# Altium footprint library RF_FILTER.PcbLib: 10 footprints
Each footprint in its own frame and in the unit in brackets; x right, y up, seen from the top. Pads: shape width x height; smd on the part's side, far side on the other; paste and mask are expansions set on the pad; w line width, h text height; cw(c..) or ccw(c..) is an arc to the next point about the centre after c.
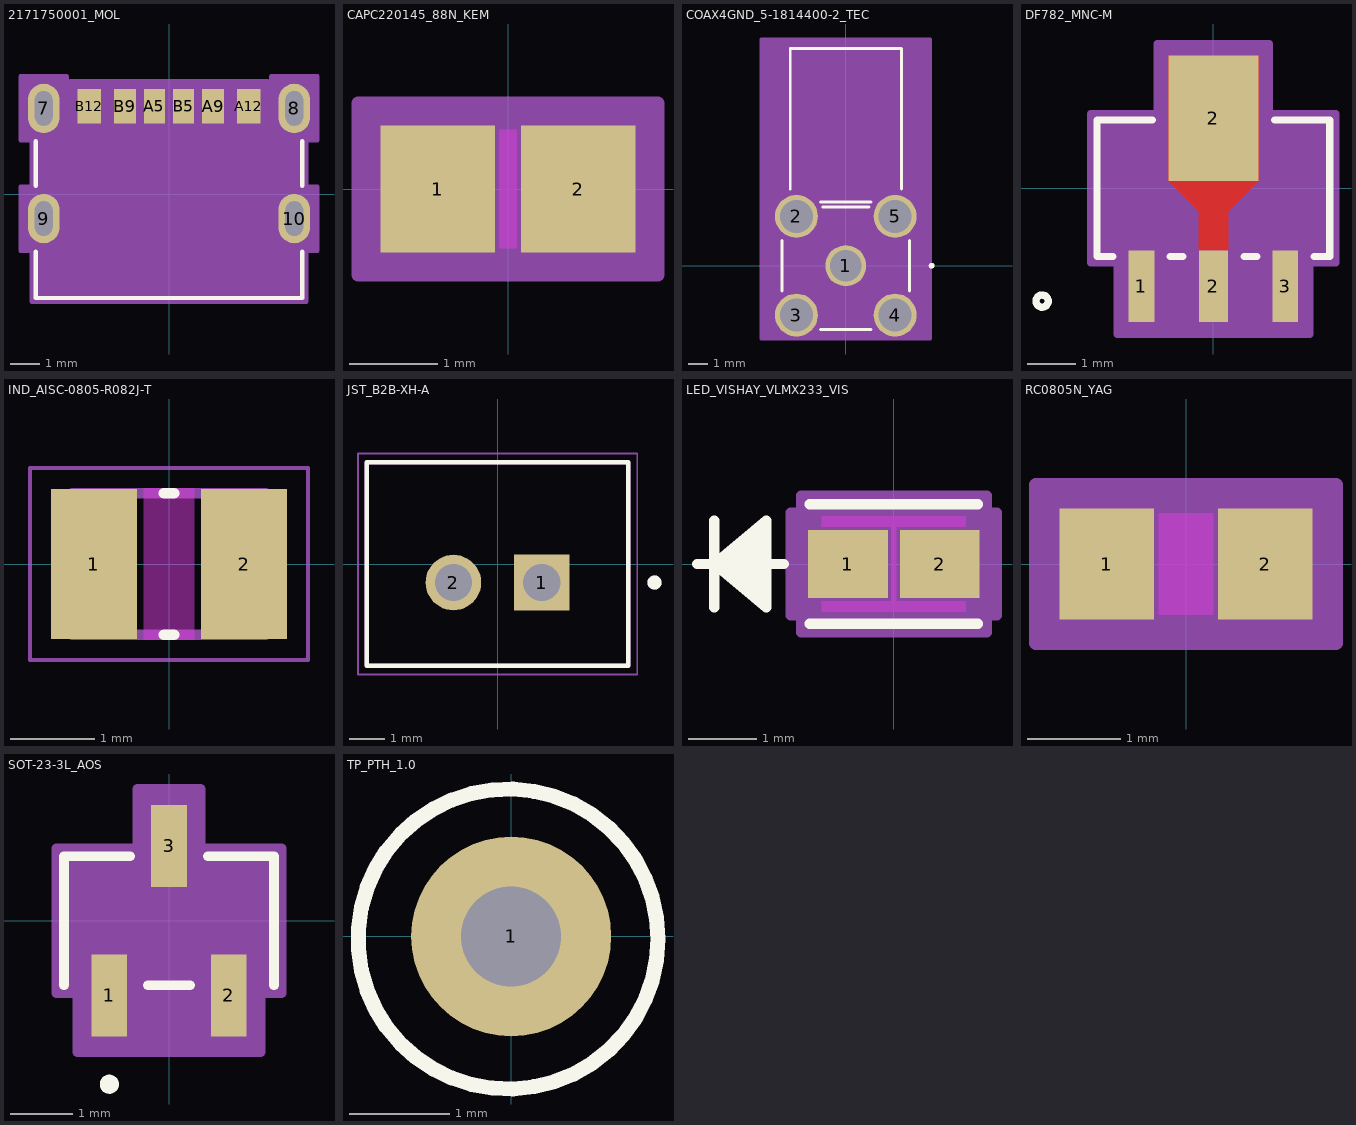
[diagram p0: the footprints below, top view; thin cyan lines are the x and y axes]

## 2171750001_MOL [mil]
pads (10):
  oval 43x67 / inner oval 43x67 / far side round 60 hole 47 slot 24 at 0 deg paste-99999 mask-33.5: 7(-170.08,116.31) 8(170.08,116.31) 9(-170.08,-33.29) 10(170.08,-33.29)
  rect 28x47 smd paste+0 mask+0: A5(-19.68,119.46) B5(19.68,119.46)
  rect 30x47 smd paste+0 mask+0: A9(59.84,119.46) B9(-59.84,119.46)
  rect 32x47 smd paste+0 mask+0: A12(108.27,119.46) B12(-108.27,119.46)
Top Overlay:
  lines w6: -181,-78.12 -181,-141 181,-141 181,-78.12 ; -181,11.54 -181,71.48 ; 181,11.54 181,71.48
Mechanical 13:
  lines w1: -176,-136 176,-136 176,136 -176,136 -176,-136
  text "*" at -32.5,65 h50
Mechanical 15:
  region: 134.27,146 134.27,152.96 -34.84,152.96 -134.27,152.96 -134.27,146 -138.58,146 -138.58,159.81 -201.58,159.81 -201.58,72.81 -186,72.81 -186,10.21 -201.58,10.21 -201.58,-76.79 -186,-76.79 -186,-146 186,-146 186,-76.79 201.58,-76.79 201.58,10.21 186,10.21 186,72.81 201.58,72.81 201.58,159.81 138.58,159.81 138.58,146
  lines w6: -34.84,152.96 134.27,152.96 134.27,146 138.58,146 138.58,159.81 201.58,159.81 201.58,72.81 186,72.81 186,10.21 201.58,10.21 201.58,-76.79 186,-76.79 186,-146 -186,-146 -186,-76.79 -201.58,-76.79 -201.58,10.21 -186,10.21 -186,72.81 -201.58,72.81 -201.58,159.81 -138.58,159.81 -138.58,146 -134.27,146 -134.27,152.96 -34.84,152.96 ; -34.84,152.96 -34.84,152.96

## CAPC220145_88N_KEM [mm]
pads (2):
  rect 1.306x1.45 smd paste+0 mask+0: 1(-0.803,0) 2(0.803,0)
Top Layer keep-out:
  region: -0.099,-0.674 -0.099,0.674 0.099,0.674 0.099,-0.674
Mechanical 13:
  lines w0.025: -1.1,-0.725 -1.1,0.725 ; -1.1,-0.725 1.1,-0.725 ; -1.1,-0.725 -0.35,-0.725 -0.35,0.725 -1.1,0.725 ; -1.1,-0.725 -1.1,0.725 ; -1.1,0.725 1.1,0.725 ; 1.1,-0.725 1.1,0.725 ; 1.1,-0.725 1.1,0.725 ; 1.1,-0.725 0.35,-0.725 0.35,0.725 1.1,0.725
Mechanical 15:
  region: 1.71,-0.979 -1.71,-0.979 -1.71,0.979 1.71,0.979
  lines w0.152: -1.71,-0.979 1.71,-0.979 1.71,0.979 -1.71,0.979 -1.71,-0.979
3D body "CAPC220145_88N_KEM.step": height 0.88, standoff 0, extent -1.1,-0.725 1.1,0.725

## COAX4GND_5-1814400-2_TEC [mil]
pads (5):
  round 83 / inner round 60 / far side round 83 hole 63 paste-99999 mask+0: 1(0,0)
  round 87 / inner round 60 / far side round 87 hole 67 paste-99999 mask+0: 2(-100,100) 3(-100,-100) 4(100,-100) 5(100,100)
Top Overlay:
  circle w6: c174,0 r3
  lines w6: -129,-51.39 -129,51.39 ; -112.5,155.2 -112.5,440 112.5,440 112.5,155.2 ; -51.39,-129 51.39,-129 ; -51.39,129 51.39,129 ; -46.68,119 46.68,119 ; 129,-51.39 129,51.39
Mechanical 13:
  circle w0: c109,0 r3
  lines w1: -124,-124 -124,124 124,124 124,-124 -124,-124 ; -107.5,124 -107.5,435 107.5,435 107.5,124 -107.5,124
Mechanical 15:
  region: 172,-148.5 -172,-148.5 -172,459.5 172,459.5
  lines w6: -172,-148.5 172,-148.5 172,459.5 -172,459.5 -172,-148.5

## DF782_MNC-M [mil]
pads (4):
  rect 20.97x58.81 smd paste+0 mask+0: 1(-59,-80.41) 3(59,-80.41)
  rect 23.97x58.81 smd paste+0 mask+0: 2(0,-80.41)
  rect 74.02x102.76 smd: 2(0,57.36)
Top Layer:
  region: 11.98,-51 -11.98,-51 -11.98,-18.98 -36.98,6.02 -36.98,108.65 36.98,108.65 36.98,6.02 11.98,-18.98
Top Overlay:
  circle w6: c-140.5,-92.5 r5
  lines w6: -82.58,-56 -95.5,-56 -95.5,56 -50.08,56 ; -35.42,-56 -25.08,-56 ; 25.08,-56 35.42,-56 ; 50.08,56 95.5,56 95.5,-56 82.58,-56
Top Paste:
  region: 11.98,-51.98 -11.98,-51.98 -11.98,-18.98 -36.98,6.02 -36.98,98.81 36.98,98.81 36.98,6.02 11.98,-18.98
Top Solder:
  region: 11.98,-51.98 -11.98,-51.98 -11.98,-18.98 -36.98,6.02 -36.98,98.81 36.98,98.81 36.98,6.02 11.98,-18.98
Mechanical 13:
  circle w1: c-80.5,-41 r5
  lines w1: -90.5,-51 90.5,-51 90.5,51 -90.5,51 -90.5,-51 ; -68.5,-98 -68.5,-51 -49.5,-51 -49.5,-98 -68.5,-98 ; -11,-98 -11,-51 11,-51 11,-98 -11,-98 ; 49.5,-98 49.5,-51 68.5,-51 68.5,-98 49.5,-98
Mechanical 15:
  region: -100.5,-61 -100.5,61 -46,61 -46,118.65 46,118.65 46,61 100.5,61 100.5,-61 79,-61 79,-119.81 -79,-119.81 -79,-61
  lines w6: -100.5,-61 -100.5,61 -46,61 -46,118.65 46,118.65 46,61 100.5,61 100.5,-61 79,-61 79,-119.81 -79,-119.81 -79,-61 -100.5,-61
3D body "DF782_MNC.step": height 65.12, standoff 0, extent -90.51,-97.99 90.51,87.01

## IND_AISC-0805-R082J-T [mm]
height 1.55
pads (2):
  rect 1.02x1.78 smd paste+0 mask+0.102: 1(-0.89,0) 2(0.89,0)
Top Layer keep-out:
  region: -0.3,0.9 0.3,0.9 0.3,-0.9 -0.3,-0.9
Top Overlay:
  lines w0.127: -0.06,-0.84 0.06,-0.84 ; -0.06,0.84 0.06,0.84
Mechanical 13:
  lines w0.127: -1.145,-0.84 1.145,-0.84 1.145,0.84 -1.145,0.84 -1.145,-0.84
Mechanical 15:
  lines w0.05: -1.65,-1.14 1.65,-1.14 1.65,1.14 -1.65,1.14 -1.65,-1.14

## JST_B2B-XH-A [mm]
height 7
pads (2):
  rect 1.575x1.575 / inner round 1.575 / far side rect 1.575x1.575 hole 1.05: 1(1.25,-0.525)
  round 1.575 hole 1.05: 2(-1.25,-0.525)
Top Overlay:
  circle w0.2: c4.44,-0.525 r0.1
  lines w0.127: -3.7,-2.875 -3.7,2.875 3.7,2.875 3.7,-2.875 -3.7,-2.875
Mechanical 13:
  circle w0.2: c4.44,-0.525 r0.1
  lines w0.127: -3.7,-2.875 -3.7,2.875 3.7,2.875 3.7,-2.875 -3.7,-2.875
Mechanical 15:
  lines w0.05: -3.95,-3.125 3.95,-3.125 3.95,3.125 -3.95,3.125 -3.95,-3.125

## LED_VISHAY_VLMX233_VIS [mil]
pads (2):
  rect 46x39 smd paste+0 mask+0: 1(-26.5,0) 2(26.5,0)
Top Layer keep-out:
  region: -41.5,-27.5 -41.5,-21.5 41.5,-21.5 41.5,-27.5
  region: -41.5,21.5 -41.5,27.5 41.5,27.5 41.5,21.5
  region: -1.5,-21.5 -1.5,21.5 1.5,21.5 1.5,-21.5
Top Overlay:
  lines w6: -113.5,0 -63.5,0 ; -103.5,-25 -103.5,25 ; -73.5,-20 -103.5,0 ; -73.5,-15 -103.5,0 ; -73.5,-10 -103.5,0 ; -73.5,-5 -103.5,0 ; -73.5,5 -103.5,0 ; -73.5,10 -103.5,0 ; -73.5,15 -103.5,0 ; -73.5,20 -103.5,0 ; -48.5,-34.5 48.5,-34.5 ; -48.5,34.5 48.5,34.5 ; -103.5,0 -73.5,-25 -73.5,25 -103.5,0
Mechanical 13:
  lines w1: -113.5,0 -63.5,0 ; -103.5,-25 -103.5,25 ; -73.5,-20 -103.5,0 ; -73.5,-15 -103.5,0 ; -73.5,-10 -103.5,0 ; -73.5,-5 -103.5,0 ; -73.5,5 -103.5,0 ; -73.5,10 -103.5,0 ; -73.5,15 -103.5,0 ; -73.5,20 -103.5,0 ; -103.5,0 -73.5,-25 -73.5,25 -103.5,0 ; -43.5,-29.5 -43.5,29.5 43.5,29.5 43.5,-29.5 -43.5,-29.5
Mechanical 15:
  region: -53.5,-29.5 -59.5,-29.5 -59.5,29.5 -53.5,29.5 -53.5,39.5 53.5,39.5 53.5,29.5 59.5,29.5 59.5,-29.5 53.5,-29.5 53.5,-39.5 -53.5,-39.5
  lines w6: -59.5,-29.5 -53.5,-29.5 -53.5,-39.5 53.5,-39.5 53.5,-29.5 59.5,-29.5 59.5,29.5 53.5,29.5 53.5,39.5 -53.5,39.5 -53.5,29.5 -59.5,29.5 -59.5,-29.5
3D body "LED_VISHAY_VLMX233_VIS.step": height 57.01, standoff 0, extent -43.5,-29.49 43.5,29.49

## RC0805N_YAG [mil]
pads (2):
  rect 40x47 smd paste+0 mask+0: 1(-33.5,0) 2(33.5,0)
Top Layer keep-out:
  region: -11.5,-21.5 -11.5,21.5 11.5,21.5 11.5,-21.5
Mechanical 13:
  lines w1: -39.5,-23.5 -39.5,23.5 ; -39.5,-23.5 39.5,-23.5 ; -39.5,-23.5 -13.5,-23.5 -13.5,23.5 -39.5,23.5 ; -39.5,-23.5 -39.5,23.5 ; -39.5,23.5 39.5,23.5 ; 39.5,-23.5 39.5,23.5 ; 39.5,-23.5 39.5,23.5 ; 39.5,-23.5 13.5,-23.5 13.5,23.5 39.5,23.5
Mechanical 15:
  region: 63.5,-33.5 -63.5,-33.5 -63.5,33.5 63.5,33.5
  lines w6: -63.5,-33.5 63.5,-33.5 63.5,33.5 -63.5,33.5 -63.5,-33.5
3D body "RC0805N_YAG.step": height 27.99, standoff 0, extent -39.49,-23.5 39.49,23.5

## SOT-23-3L_AOS [mil]
pads (3):
  rect 22.36x51.56 smd paste+0 mask+0: 1(-37.5,-47) 2(37.5,-47) 3(0,47)
Top Overlay:
  circle w6: c-37.5,-102.78 r3
  lines w6: -66,-40.5 -66,40.5 -24.28,40.5 ; -13.22,-40.5 13.22,-40.5 ; 24.28,40.5 66,40.5 66,-40.5
Mechanical 13:
  circle w1: c-37.5,-25.5 r3
  lines w1: -61,-35.5 -61,35.5 61,35.5 61,-35.5 -61,-35.5 ; -47.5,-59 -27.5,-59 -27.5,-35.5 -47.5,-35.5 -47.5,-59 ; -10,35.5 -10,59 10,59 10,35.5 -10,35.5 ; 27.5,-59 47.5,-59 47.5,-35.5 27.5,-35.5 27.5,-59
Mechanical 15:
  region: -71,-45.5 -71,45.5 -20,45.5 -20,82.78 20,82.78 20,45.5 71,45.5 71,-45.5 57.5,-45.5 57.5,-82.78 -57.5,-82.78 -57.5,-45.5
  lines w6: -71,-45.5 -57.5,-45.5 -57.5,-82.78 57.5,-82.78 57.5,-45.5 71,-45.5 71,45.5 20,45.5 20,82.78 -20,82.78 -20,45.5 -71,45.5 -71,-45.5
3D body "SOT-23-3L_AOS.step": height 49.09, standoff 0, extent -60.98,-59.02 60.98,59.02

## TP_PTH_1.0 [mm]
pads (1):
  round 2 hole 1: 1(0,0)
Top Overlay:
  circle w0.15: c-0.032,-0.026 r1.5